# Altium schematic symbol library STM32F103CBT6.SchLib: 1 symbol
Pins are listed as number, name and electrical type; pins without a type are passive.

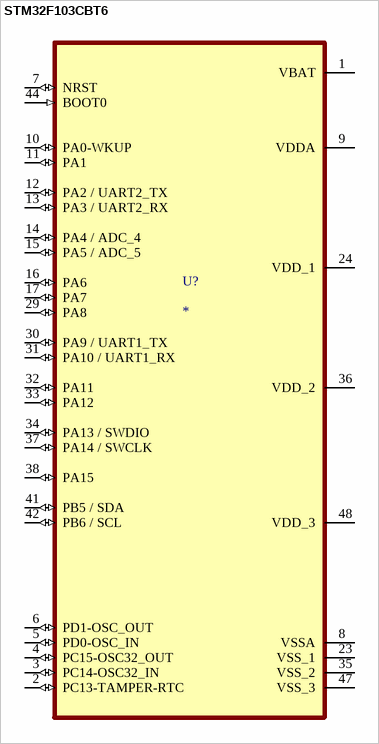
[diagram p0: symbol STM32F103CBT6]

## STM32F103CBT6
designator U?
ARMÂ® CortexÂ®-M3 STM32F1 Microcontroller IC 32-Bit Single-Core 72MHz 128KB (128K x 8) FLASH; MF: STMicroelectronics; MP: STM32F103CBT6; SnapEDA_Link: https://www.snapeda.com/parts/STM32F103CBT6/STMicroelectronics/view-part/?ref=snap; Package: LQFP-48 STMicroelectronics; Value: *; Check_prices: https://www.snapeda.com/parts/STM32F103CBT6/STMicroelectronics/view-part/?ref=eda
footprint QFP50P900X900X160-48N
pins: 1 VBAT (power), 2 PC13-TAMPER-RTC (io), 3 PC14-OSC32_IN (io), 4 PC15-OSC32_OUT (io), 5 PD0-OSC_IN (io), 6 PD1-OSC_OUT (io), 7 NRST (io), 8 VSSA (power), 9 VDDA (power), 10 PA0-WKUP (io), 11 PA1 (io), 12 PA2 / UART2_TX (io), 13 PA3 / UART2_RX (io), 14 PA4 / ADC_4 (io), 15 PA5 / ADC_5 (io), 16 PA6 (io), 17 PA7 (io), 23 VSS_1 (power), 24 VDD_1 (power), 29 PA8 (io), 30 PA9 / UART1_TX (io), 31 PA10 / UART1_RX (io), 32 PA11 (io), 33 PA12 (io), 34 PA13 / SWDIO (io), 35 VSS_2 (power), 36 VDD_2 (power), 37 PA14 / SWCLK (io), 38 PA15 (io), 41 PB5 / SDA (io), 42 PB6 / SCL (io), 44 BOOT0 (in), 47 VSS_3 (power), 48 VDD_3 (power)